# Altium footprint library poyu.PcbLib: 22 footprints (part 2 of 2)
Each footprint in its own frame and in the unit in brackets; x right, y up, seen from the top. Pads: shape width x height; smd on the part's side, far side on the other; paste and mask are expansions set on the pad; w line width, h text height; cw(c..) or ccw(c..) is an arc to the next point about the centre after c.
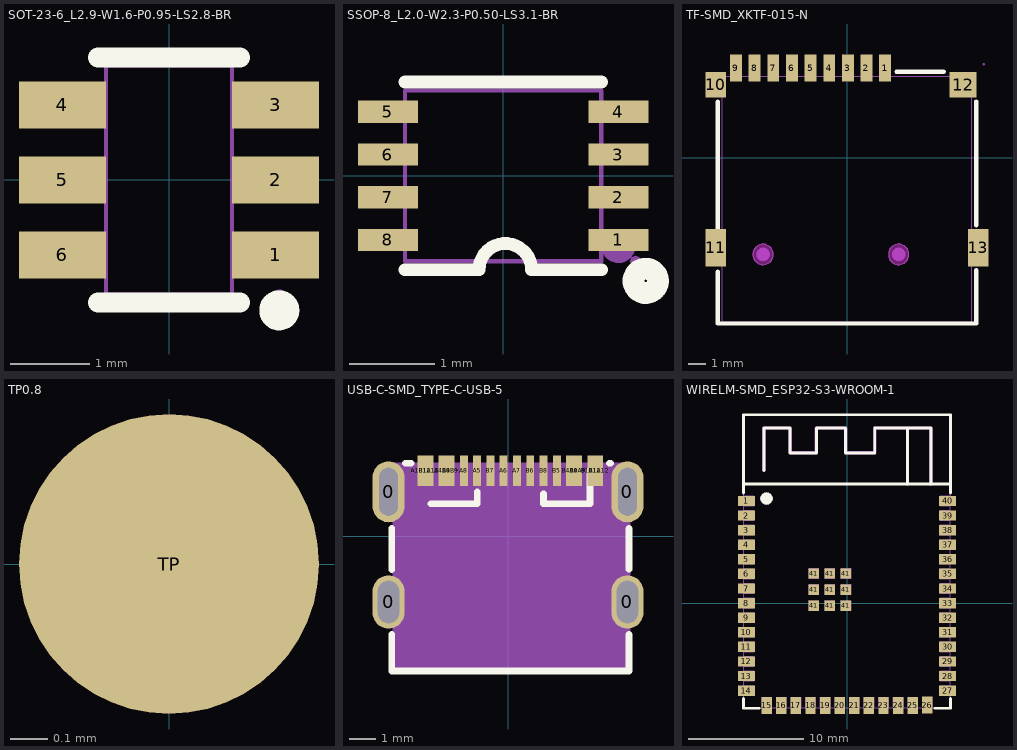
[diagram p1: the footprints below, top view; thin cyan lines are the x and y axes]

## SOT-23-6_L2.9-W1.6-P0.95-LS2.8-BR [mm]
pads (6):
  rect 1.1x0.6 smd paste+0 mask+0.051: 1(1.35,-0.95) 2(1.35,0) 3(1.35,0.95) 4(-1.35,0.95) 5(-1.35,0) 6(-1.35,-0.95)
Top Overlay:
  circle w0.254: c1.397,-1.651 r0.127
  lines w0.254: -0.9,-1.55 0.9,-1.55 ; -0.9,1.55 0.9,1.55
Mechanical 6:
  circle w0.2: c1.4,-0.95 r0.1
Mechanical 15:
  region: 1.46,-1.45 1.46,-1.475 1.425,-1.51 1.375,-1.51 1.34,-1.475 1.34,-1.45 1.34,-1.425 1.375,-1.39 1.425,-1.39 1.46,-1.425 1.46,-1.45
  region: -0.925,-1.165 -0.925,-0.735 -1.4,-0.735 -1.4,-1.165
  region: -0.925,-0.215 -0.925,0.215 -1.4,0.215 -1.4,-0.215
  region: -0.925,0.735 -0.925,1.165 -1.4,1.165 -1.4,0.735
  region: -0.935,0.735 -0.935,1.165 -0.79,1.165 -0.79,0.735
  region: 0.925,0.735 0.925,1.165 1.4,1.165 1.4,0.735
  region: 0.925,-0.215 0.925,0.215 1.4,0.215 1.4,-0.215
  region: 0.925,-1.165 0.925,-0.735 1.4,-0.735 1.4,-1.165
  region: -0.935,-0.215 -0.935,0.215 -0.79,0.215 -0.79,-0.215
  region: -0.935,-1.165 -0.935,-0.735 -0.79,-0.735 -0.79,-1.165
  region: 0.935,-0.735 0.935,-1.165 0.79,-1.165 0.79,-0.735
  region: 0.935,0.215 0.935,-0.215 0.79,-0.215 0.79,0.215
  region: 0.935,1.165 0.935,0.735 0.79,0.735 0.79,1.165
  lines w0.051: -0.8,-1.45 -0.8,1.45 0.8,1.45 0.8,-1.45 -0.8,-1.45

## SSOP-8_L2.0-W2.3-P0.50-LS3.1-BR [mm]
pads (8):
  rect 0.7x0.26 smd: 1(1.35,-0.75) 2(1.35,-0.25) 3(1.35,0.25) 4(1.35,0.75) 5(-1.35,0.75) 6(-1.35,0.25) 7(-1.35,-0.25) 8(-1.35,-0.75)
Top Overlay:
  circle w0.254: c1.67,-1.23 r0.143
  lines w0.15: -1.15,-1.1 -0.282,-1.1 cw(c0.025,-1.099) 0.333,-1.099 ; -1.15,1.1 1.15,1.1 ; 0.333,-1.1 1.15,-1.1
Mechanical 6:
  circle w0.2: c1.35,-0.82 r0.1
Mechanical 15:
  region: 1.615,-1 1.596,-1.046 1.55,-1.065 1.504,-1.046 1.485,-1 1.504,-0.954 1.55,-0.935 1.596,-0.954
  region: -1.14,-0.86 -1.285,-0.86 -1.285,-0.64 -1.14,-0.64
  region: -1.275,-0.86 -1.55,-0.86 -1.55,-0.64 -1.275,-0.64
  region: -1.14,-0.36 -1.285,-0.36 -1.285,-0.14 -1.14,-0.14
  region: -1.275,-0.36 -1.55,-0.36 -1.55,-0.14 -1.275,-0.14
  region: -1.14,0.14 -1.285,0.14 -1.285,0.36 -1.14,0.36
  region: -1.275,0.14 -1.55,0.14 -1.55,0.36 -1.275,0.36
  region: -1.14,0.64 -1.285,0.64 -1.285,0.86 -1.14,0.86
  region: -1.275,0.64 -1.55,0.64 -1.55,0.86 -1.275,0.86
  region: 1.285,0.64 1.14,0.64 1.14,0.86 1.285,0.86
  region: 1.55,0.64 1.275,0.64 1.275,0.86 1.55,0.86
  region: 1.285,0.14 1.14,0.14 1.14,0.36 1.285,0.36
  region: 1.55,0.14 1.275,0.14 1.275,0.36 1.55,0.36
  region: 1.285,-0.36 1.14,-0.36 1.14,-0.14 1.285,-0.14
  region: 1.55,-0.36 1.275,-0.36 1.275,-0.14 1.55,-0.14
  region: 1.285,-0.86 1.14,-0.86 1.14,-0.64 1.285,-0.64
  region: 1.55,-0.86 1.275,-0.86 1.275,-0.64 1.55,-0.64
  lines w0.051: -1.15,-1 -1.15,1 1.15,1 1.15,-1 -1.15,-1

## TF-SMD_XKTF-015-N [mm]
pads (13):
  rect 0.7x1.6 smd: 1(2.25,5.3) 2(1.15,5.3) 3(0.05,5.3) 4(-1.05,5.3) 5(-2.15,5.3) 6(-3.25,5.3) 7(-4.35,5.3) 8(-5.45,5.3) 9(-6.55,5.3)
  rect 1.2x1.5 smd: 10(-7.75,4.3)
  rect 1.2x2.2 smd: 11(-7.75,-5.3) 13(7.75,-5.3)
  rect 1.6x1.5 smd: 12(6.85,4.3)
Top Overlay:
  lines w0.254: -7.619,-6.717 -7.619,-9.778 7.621,-9.778 7.621,-6.717 7.621,-6.631 ; -7.62,-4.191 -7.62,3.302 ; 2.921,5.08 5.715,5.08 ; 7.621,-3.969 7.621,3.319
Keep-Out Layer:
  board cut-out: -4.35,-5.7 -4.35,-5.819 -4.441,-6.04 -4.61,-6.209 -4.831,-6.3 -5.069,-6.3 -5.29,-6.209 -5.459,-6.04 -5.55,-5.819 -5.55,-5.7 -5.55,-5.581 -5.459,-5.36 -5.29,-5.191 -5.069,-5.1 -4.831,-5.1 -4.61,-5.191 -4.441,-5.36 -4.35,-5.581 -4.35,-5.7
  board cut-out: 3.65,-5.7 3.65,-5.819 3.559,-6.04 3.39,-6.209 3.169,-6.3 2.931,-6.3 2.71,-6.209 2.541,-6.04 2.45,-5.819 2.45,-5.7 2.45,-5.581 2.541,-5.36 2.71,-5.191 2.931,-5.1 3.169,-5.1 3.39,-5.191 3.559,-5.36 3.65,-5.581 3.65,-5.7
Keep-Out Layer:
  circle w0.025: c-4.95,-5.7 r0.6
  circle w0.025: c3.05,-5.7 r0.6
  region: -4.35,-5.7 -4.35,-5.819 -4.441,-6.04 -4.61,-6.209 -4.831,-6.3 -5.069,-6.3 -5.29,-6.209 -5.459,-6.04 -5.55,-5.819 -5.55,-5.7 -5.55,-5.581 -5.459,-5.36 -5.29,-5.191 -5.069,-5.1 -4.831,-5.1 -4.61,-5.191 -4.441,-5.36 -4.35,-5.581 -4.35,-5.7
  region: 3.65,-5.7 3.65,-5.819 3.559,-6.04 3.39,-6.209 3.169,-6.3 2.931,-6.3 2.71,-6.209 2.541,-6.04 2.45,-5.819 2.45,-5.7 2.45,-5.581 2.541,-5.36 2.71,-5.191 2.931,-5.1 3.169,-5.1 3.39,-5.191 3.559,-5.36 3.65,-5.581 3.65,-5.7
Mechanical 1:
  circle w0.025: c-4.95,-5.7 r0.6
  circle w0.025: c3.05,-5.7 r0.6
Mechanical 6:
  circle w0.4: c3.05,-5.7 r0.2
  circle w0.4: c-4.95,-5.7 r0.2
Mechanical 15:
  region: 7.37,-4.482 8.07,-4.482 8.07,-6.082 7.37,-6.082
  region: -8.07,-4.482 -7.37,-4.482 -7.37,-6.082 -8.07,-6.082
  region: 6.48,3.818 6.48,4.818 7.18,4.818 7.18,3.818
  region: -8.07,4.818 -7.37,4.818 -7.37,3.818 -8.07,3.818
  region: -6.7,5.517 -6.4,5.517 -6.4,4.767 -6.7,4.767
  region: -5.6,5.517 -5.3,5.517 -5.3,4.767 -5.6,4.767
  region: -4.5,5.517 -4.2,5.517 -4.2,4.767 -4.5,4.767
  region: -3.4,5.517 -3.1,5.517 -3.1,4.767 -3.4,4.767
  region: -2.3,5.517 -2,5.517 -2,4.767 -2.3,4.767
  region: -1.2,5.517 -0.9,5.517 -0.9,4.767 -1.2,4.767
  region: -0.1,5.517 0.2,5.517 0.2,4.767 -0.1,4.767
  region: 1,5.517 1.3,5.517 1.3,4.767 1,4.767
  region: 2.1,5.517 2.4,5.517 2.4,4.767 2.1,4.767
  region: 8.13,5.517 8.13,5.493 8.094,5.457 8.045,5.457 8.01,5.493 8.01,5.517 8.01,5.542 8.045,5.577 8.094,5.577 8.13,5.542 8.13,5.517
  lines w0.051: -7.375,-9.683 7.375,-9.683 7.375,4.817 -7.375,4.817 -7.375,-9.683

## TP0.8 [mm]
height 1
pads (1):
  round 0.8 smd: TP(0,0)

## USB-C-SMD_TYPE-C-USB-5 [mm]
pads (20):
  oval 1.2x2 hole 0.8 slot 1.6 at 90 deg: 0(-4.5,-2.475) 0(4.5,-2.475)
  oval 1.2x2.3 hole 0.7 slot 1.8 at 90 deg: 0(-4.5,1.675) 0(4.5,1.675)
  rect 0.3x1.15 smd: A1B12(-3.262,2.473) A4B9(-2.462,2.471) A4B9(-2.162,2.471) A5(-1.162,2.475) A6(-0.162,2.475) A7(0.337,2.473) B1A12(-2.963,2.473) B1A12(3.138,2.475) B1A12(3.438,2.475) B4A9(2.337,2.475) B4A9(2.638,2.475) B5(1.838,2.475) B6(0.838,2.475) B7(-0.663,2.473)
  rect 0.3x1.148 smd: A8(-1.663,2.475) B8(1.337,2.475)
Top Overlay:
  lines w0.254: -4.382,-3.698 -4.382,-5.075 4.558,-5.075 4.558,-3.704 ; -4.382,-1.252 -4.382,0.302 ; -3.856,2.75 -3.644,2.75 ; -2.912,1.225 -1.162,1.225 -1.162,1.669 ; 1.335,1.599 1.335,1.228 3.085,1.228 3.085,2.478 ; 3.819,2.75 3.856,2.75 ; 4.558,-1.246 4.558,0.296
Mechanical 2:
  region: 4.597,2.76 -4.343,2.76 -4.343,-5.14 4.597,-5.14

## WIRELM-SMD_ESP32-S3-WROOM-1 [mm]
pads (49):
  rect 1.5x0.9 smd: 1(-8.75,8.895) 2(-8.75,7.625) 3(-8.75,6.355) 4(-8.75,5.085) 5(-8.75,3.815) 6(-8.75,2.545) 7(-8.75,1.275) 8(-8.75,0.005) 9(-8.75,-1.265) 10(-8.75,-2.535) 11(-8.75,-3.805) 12(-8.75,-5.075) 13(-8.75,-6.345) 14(-8.75,-7.615) 27(8.75,-7.615) 28(8.75,-6.345) 29(8.75,-5.075) 30(8.75,-3.805) 31(8.75,-2.535) 32(8.75,-1.265) 33(8.75,0.005) 34(8.75,1.275) 35(8.75,2.545) 36(8.75,3.815) 37(8.75,5.085) 38(8.75,6.355) 39(8.75,7.625) 40(8.75,8.895)
  rect 0.9x1.5 smd: 15(-6.985,-8.895) 16(-5.715,-8.895) 17(-4.445,-8.895) 18(-3.175,-8.895) 19(-1.905,-8.895) 20(-0.635,-8.895) 21(0.635,-8.895) 22(1.905,-8.895) 23(3.175,-8.895) 24(4.445,-8.895) 25(5.715,-8.895) 26(6.985,-8.865)
  rect 0.9x0.9 smd: 41(-2.9,-0.225) 41(-2.9,1.175) 41(-2.9,2.575) 41(-1.5,-0.225) 41(-1.5,1.175) 41(-1.5,2.575) 41(-0.1,-0.225) 41(-0.1,1.175) 41(-0.1,2.575)
Top Overlay:
  region: -7.539,9.1 -7.498,9.306 -7.381,9.481 -7.206,9.598 -7,9.639 -6.794,9.598 -6.619,9.481 -6.502,9.306 -6.461,9.1 -6.502,8.894 -6.619,8.719 -6.794,8.602 -7,8.561 -7.206,8.602 -7.381,8.719 -7.498,8.894
  lines w0.254: -9,-8.296 -9,-9.144 -7.666,-9.144 ; -9,9.576 -9,16.395 9,16.395 ; -9,10.355 9.017,10.355 ; -7.239,11.557 -7.239,15.24 -4.953,15.24 -4.953,13.081 -2.667,13.081 -2.667,15.24 -0.127,15.24 -0.127,13.081 2.413,13.081 2.413,15.24 5.265,15.24 5.265,10.355 ; 5.062,15.24 7.297,15.24 7.297,10.355 ; 7.666,-9.144 9.017,-9.144 9.017,-8.296 ; 9.017,9.576 9.017,16.383
Mechanical 1:
  drawing of 2 lines, arcs and shapes, not listed
Mechanical 3:
  drawing of 54 lines, arcs and shapes, not listed